# Altium footprint library BlackfinSOM.PcbLib: 28 footprints (part 2 of 2)
Each footprint in its own frame and in the unit in brackets; x right, y up, seen from the top. Pads: shape width x height; smd on the part's side, far side on the other; paste and mask are expansions set on the pad; w line width, h text height; cw(c..) or ccw(c..) is an arc to the next point about the centre after c.
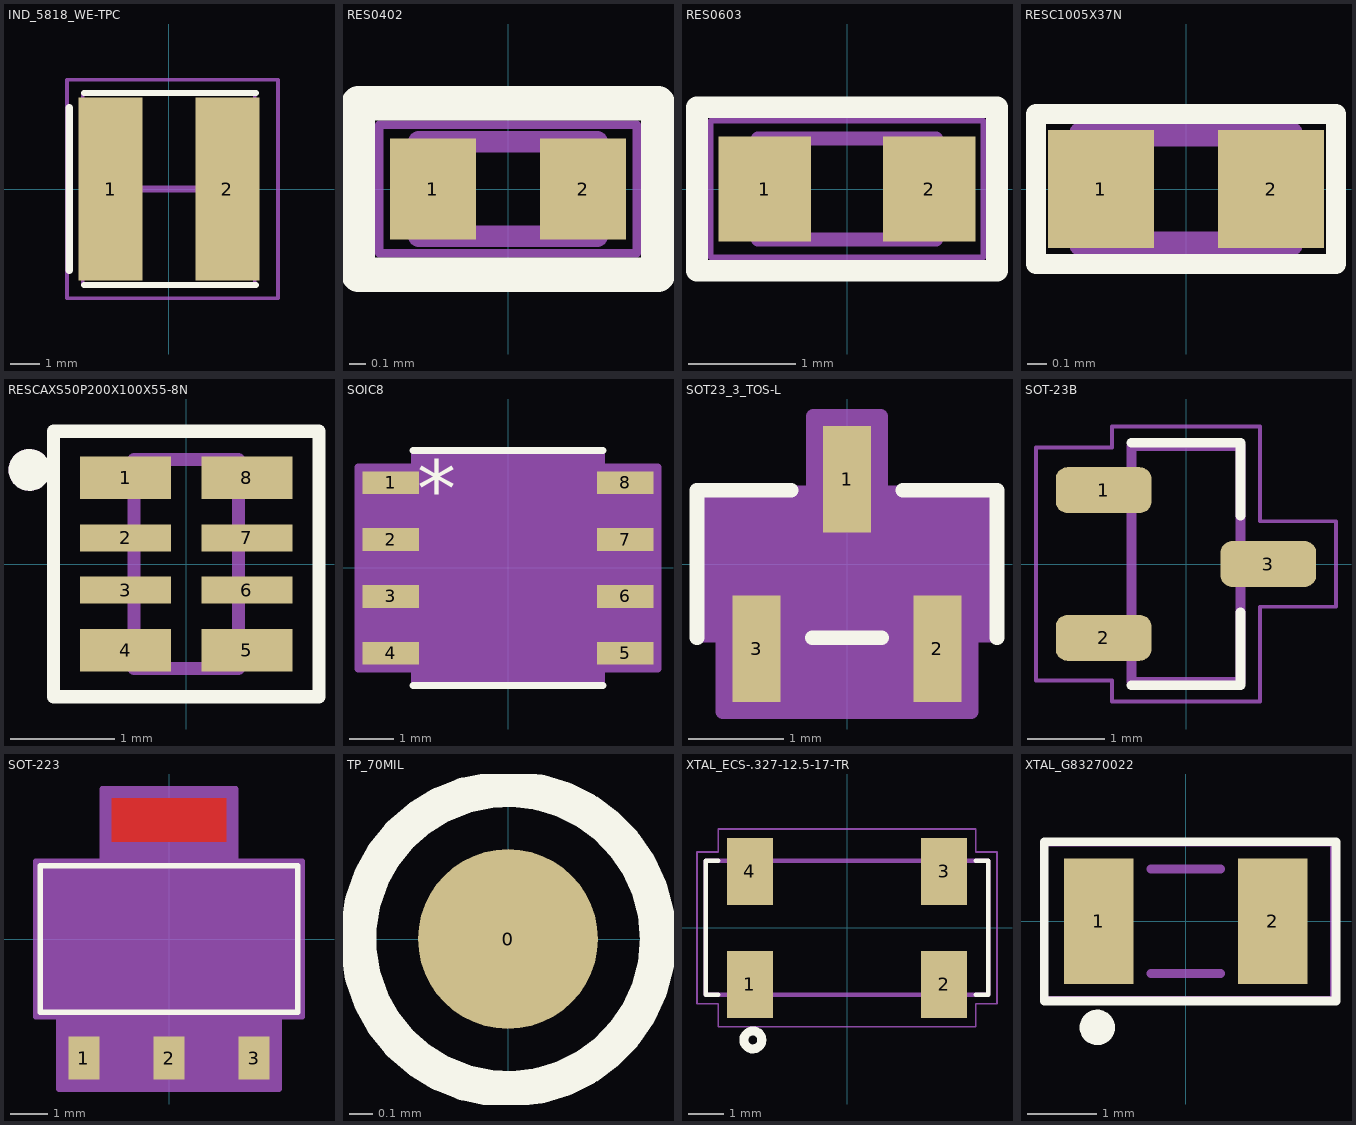
[diagram p1: the footprints below, top view; thin cyan lines are the x and y axes]

## IND_5818_WE-TPC [mm]
pads (2):
  rect 2.2x6.3 smd: 1(-2,0) 2(2.01,0)
Top Overlay:
  lines w0.203: -2.921,-3.302 2.991,-3.302 ; -2.921,3.302 2.991,3.302
  lines w0.254: -3.429,-2.794 -3.429,2.794
Mechanical 13:
  lines w0.127: -2.956,-3.267 -2.956,3.267 ; 2.956,-3.267 2.956,3.267
  lines w0.25: -2.05,0 2.05,0
Mechanical 15:
  lines w0.127: -3.5,-3.75 -3.5,3.75 3.75,3.75 3.75,-3.75 -3.5,-3.75
3D body "744053101.stp": height 2.54, standoff -0.26, extent -2.9,-2.773 2.9,3.027

## RES0402 [mm]
pads (2):
  rect 0.51x0.6 smd: 1(-0.445,0) 2(0.445,0)
Top Overlay:
  lines w0.203: -0.889,-0.508 -0.889,0.508 0.889,0.508 0.889,-0.508 -0.889,-0.508
Mechanical 13:
  lines w0.127: -0.53,-0.28 0.53,-0.28 0.53,0.28 -0.53,0.28 -0.53,-0.28
Mechanical 15:
  lines w0.05: -0.762,-0.381 0.762,-0.381 0.762,0.381 -0.762,0.381 -0.762,-0.381
3D body "User Library-RES1005-0402.STEP": height 0.3, standoff 0, extent -0.546,-0.246 0.454,0.254

## RES0603 [mm]
pads (2):
  rect 0.86x0.98 smd: 1(-0.765,0) 2(0.765,0)
Top Overlay:
  lines w0.203: -1.397,-0.762 -1.397,0.762 1.397,0.762 1.397,-0.762 -1.397,-0.762
Mechanical 13:
  lines w0.127: -0.83,-0.47 0.83,-0.47 0.83,0.47 -0.83,0.47 -0.83,-0.47
Mechanical 15:
  lines w0.05: -1.27,-0.635 1.27,-0.635 1.27,0.635 -1.27,0.635 -1.27,-0.635
3D body "User Library-CR1608-0603.STEP": height 0.45, standoff 0, extent -0.8,-0.4 0.8,0.4

## RESC1005X37N [mm]
pads (2):
  rect 0.54x0.6 smd: 1(-0.432,0) 2(0.432,0)
Top Overlay:
  lines w0.102: -0.762,-0.381 0.762,-0.381 0.762,0.381 -0.762,0.381 -0.762,-0.381
Mechanical 13:
  lines w0.127: -0.53,-0.28 0.53,-0.28 0.53,0.28 -0.53,0.28 -0.53,-0.28
Mechanical 15:
  lines w0.05: -0.762,-0.381 0.762,-0.381 0.762,0.381 -0.762,0.381 -0.762,-0.381

## RESCAXS50P200X100X55-8N [mm]
pads (8):
  rect 0.87x0.41 smd: 1(-0.58,0.825) 4(-0.58,-0.825) 5(0.58,-0.825) 8(0.58,0.825)
  rect 0.87x0.26 smd: 2(-0.58,0.25) 3(-0.58,-0.25) 6(0.58,-0.25) 7(0.58,0.25)
Top Overlay:
  circle w0.2: c-1.5,0.9 r0.1
  lines w0.127: -1.27,-1.27 1.27,-1.27 1.27,1.27 -1.27,1.27 -1.27,-1.27
Mechanical 13:
  circle w0.2: c-1.5,0.9 r0.1
  lines w0.127: -0.5,-1 0.5,-1 0.5,1 -0.5,1 -0.5,-1
Mechanical 15:
  lines w0.05: -1.27,-1.28 1.27,-1.28 1.27,1.28 -1.27,1.28 -1.27,-1.28
3D body "User Library-YC124.STEP": height 0.36, standoff 0, extent -0.492,-1 0.508,1

## SOIC8 [mil]
pads (8):
  rect 49.5x20 smd paste+0 mask+0: 1(-103.25,75) 2(-103.25,25) 3(-103.25,-25) 4(-103.25,-75) 5(103.25,-75) 6(103.25,-25) 7(103.25,25) 8(103.25,75)
Top Overlay:
  lines w6: -83.5,-103.5 83.5,-103.5 ; -83.5,103.5 83.5,103.5
  text "*" at -80,45 h50
Mechanical 13:
  lines w0: -12,98.5 ccw(c0,98.5) 12,98.5
  lines w1: -122,-85 -122,-65 -78.5,-65 -78.5,-85 -122,-85 ; -122,-35 -122,-15 -78.5,-15 -78.5,-35 -122,-35 ; -122,15 -122,35 -78.5,35 -78.5,15 -122,15 ; -122,65 -122,85 -78.5,85 -78.5,65 -122,65 ; -78.5,-98.5 78.5,-98.5 78.5,98.5 -78.5,98.5 -78.5,-98.5 ; 78.5,-85 78.5,-65 122,-65 122,-85 78.5,-85 ; 78.5,-35 78.5,-15 122,-15 122,-35 78.5,-35 ; 78.5,15 78.5,35 122,35 122,15 78.5,15 ; 78.5,65 78.5,85 122,85 122,65 78.5,65
  text "*" at -76,45.5 h50
Mechanical 15:
  region: -82.5,-89 -132,-89 -132,89 -82.5,89 -82.5,102.5 82.5,102.5 82.5,89 132,89 132,-89 82.5,-89 82.5,-102.5 -82.5,-102.5
  lines w6: -132,-89 -132,89 -82.5,89 -82.5,102.5 82.5,102.5 82.5,89 132,89 132,-89 82.5,-89 82.5,-102.5 -82.5,-102.5 -82.5,-89 -132,-89
3D body: height 10, standoff 0, extent 0,0 10,10
3D body "SOIC8_751EB_ONS-L.step": height 69.09, standoff 0, extent -122,-98.49 122.01,98.51

## SOT23_3_TOS-L [mil]
pads (3):
  rect 20x44 smd paste+0 mask+0: 1(0,35) 2(37.4,-35) 3(-37.4,-35)
Top Overlay:
  lines w6: -62,-30.5 -62,30.5 -23.1,30.5 ; -14.3,-30.5 14.3,-30.5 ; 23.1,30.5 62,30.5 62,-30.5
Mechanical 13:
  circle w0: c-37.4,-15.5 r3
  lines w1: -57,-25.5 57,-25.5 57,25.5 -57,25.5 -57,-25.5 ; -47.4,-51 -47.4,-25.5 -27.4,-25.5 -27.4,-51 -47.4,-51 ; -10,25.5 10,25.5 10,51 -10,51 -10,25.5 ; 27.4,-51 27.4,-25.5 47.4,-25.5 47.4,-51 27.4,-51
Mechanical 15:
  region: -61,-29.5 -61,29.5 -14,29.5 -14,61 14,61 14,29.5 61,29.5 61,-29.5 51.4,-29.5 51.4,-61 -51.4,-61 -51.4,-29.5
  lines w6: -61,-29.5 -61,29.5 -14,29.5 -14,61 14,61 14,29.5 61,29.5 61,-29.5 51.4,-29.5 51.4,-61 -51.4,-61 -51.4,-29.5 -61,-29.5
3D body "bzx84-a3v3_215.stp": height 39.37, standoff 0, extent -59.17,-45.28 55,45.28
3D body: height 10, standoff 0, extent 0,0 10,10

## SOT-23B [mm]
pads (3):
  rrect50% 1.23x0.59 smd: 1(-1.06,0.95) 2(-1.06,-0.95) 3(1.06,0)
Top Overlay:
  lines w0.127: -0.7,-1.56 0.7,-1.56 0.7,-0.62 ; -0.7,1.56 0.7,1.56 0.7,0.62
Mechanical 13:
  lines w0.127: -0.7,-1.52 0.7,-1.52 0.7,1.52 -0.7,1.52 -0.7,-1.52
Mechanical 15:
  lines w0.05: -1.93,-1.5 -0.95,-1.5 -0.95,-1.77 0.95,-1.77 0.95,-0.55 1.93,-0.55 1.93,0.55 0.95,0.55 0.95,1.77 -0.95,1.77 -0.95,1.5 -1.93,1.5 -1.93,-1.5
3D body "SOT-23_MC_MCH-M.step": height 1.12, standoff 0, extent -1.32,-1.525 1.32,1.525

## SOT-223 [mil]
pads (3):
  rect 33x46 smd paste+0 mask+0: 1(-90.55,-126.7) 2(0,-126.7) 3(90.55,-126.7)
Top Layer:
  region: 61,103.7 61,149.7 -61,149.7 -61,103.7
Top Overlay:
  lines w6: -136.89,-77.83 -136.89,77.83 136.89,77.83 136.89,-77.83 -136.89,-77.83
Top Paste:
  region: 61,103.7 61,149.7 -61,149.7 -61,103.7
Top Solder:
  region: 61,93.7 61,155.7 -61,155.7 -61,93.7
Mechanical 13:
  circle w0: c-121.89,-62.83 r5
  lines w1: -131.89,-72.83 -131.89,72.83 131.89,72.83 131.89,-72.83 -131.89,-72.83 ; -107.05,-143.7 -74.05,-143.7 -74.05,-72.83 -107.05,-72.83 -107.05,-143.7 ; -61,72.83 -61,143.7 61,143.7 61,72.83 -61,72.83 ; -16.5,-143.7 16.5,-143.7 16.5,-72.83 -16.5,-72.83 -16.5,-143.7 ; 74.05,-143.7 107.05,-143.7 107.05,-72.83 74.05,-72.83 74.05,-143.7
Mechanical 15:
  region: -141.89,-82.83 -141.89,82.83 -71,82.83 -71,159.7 71,159.7 71,82.83 141.89,82.83 141.89,-82.83 117.05,-82.83 117.05,-159.7 -117.05,-159.7 -117.05,-82.83
  lines w6: -141.89,-82.83 -117.05,-82.83 -117.05,-159.7 117.05,-159.7 117.05,-82.83 141.89,-82.83 141.89,82.83 71,82.83 71,159.7 -71,159.7 -71,82.83 -141.89,82.83 -141.89,-82.83
3D body: height 10, standoff 0, extent 0,0 10,10
3D body "SOT-223_3MC_MCH.step": height 70.98, standoff 0, extent -131.88,-143.69 131.9,143.7

## TP_70MIL [mil]
pads (1):
  round 30 smd: 0(0,0)
Top Overlay:
  circle w6: c0,0 r25

## XTAL_ECS-.327-12.5-17-TR [mm]
pads (4):
  rect 1.3x1.9 smd: 1(-2.75,-1.6) 2(2.75,-1.6) 3(2.75,1.6) 4(-2.75,1.6)
Top Overlay:
  circle w0.254: c-2.667,-3.175 r0.254
  lines w0.127: -4,-1.9 -4,1.9 ; -3.99,-1.9 -3.654,-1.9 ; -3.99,1.9 -3.654,1.9 ; 3.654,-1.9 3.98,-1.9 3.98,-1.89 ; 3.654,1.9 3.97,1.9 ; 4,-1.9 4,1.9
Mechanical 13:
  lines w0.127: -4,-1.9 4,-1.9 4,1.9 -4,1.9 -4,-1.9
Mechanical 15:
  lines w0.05: -4.25,-2.15 -3.65,-2.15 -3.65,-2.8 3.65,-2.8 3.65,-2.15 4.25,-2.15 4.25,2.15 3.65,2.15 3.65,2.8 -3.65,2.8 -3.65,2.15 -4.25,2.15 -4.25,-2.15
3D body "ECS-.327-12.5-17X-TR.STEP": height 2.5, standoff 0, extent -4.02,-1.9 4.02,1.9

## XTAL_G83270022 [mm]
pads (2):
  rect 1x1.8 smd: 1(-1.25,0) 2(1.25,0)
Top Overlay:
  circle w0.254: c-1.27,-1.524 r0.127
  lines w0.127: -2.032,-1.143 2.159,-1.143 2.159,1.143 -2.032,1.143 -2.032,-1.143
Mechanical 13:
  lines w0.127: -0.5,-0.75 0.5,-0.75 ; -0.5,0.75 0.5,0.75
Mechanical 15:
  lines w0.05: -2,-1.1 -2,1.1 2.1,1.1 2.1,-1.1 -2,-1.1
3D body "User Library-KX-327NHT-1.STEP": height 0.71, standoff 0, extent -1.6,-0.75 1.6,0.75